# Altium footprint library IT_SENSOR_PCB.PcbLib: 1 footprints
Each footprint in its own frame and in the unit in brackets; x right, y up, seen from the top. Pads: shape width x height; smd on the part's side, far side on the other; paste and mask are expansions set on the pad; w line width, h text height; cw(c..) or ccw(c..) is an arc to the next point about the centre after c.
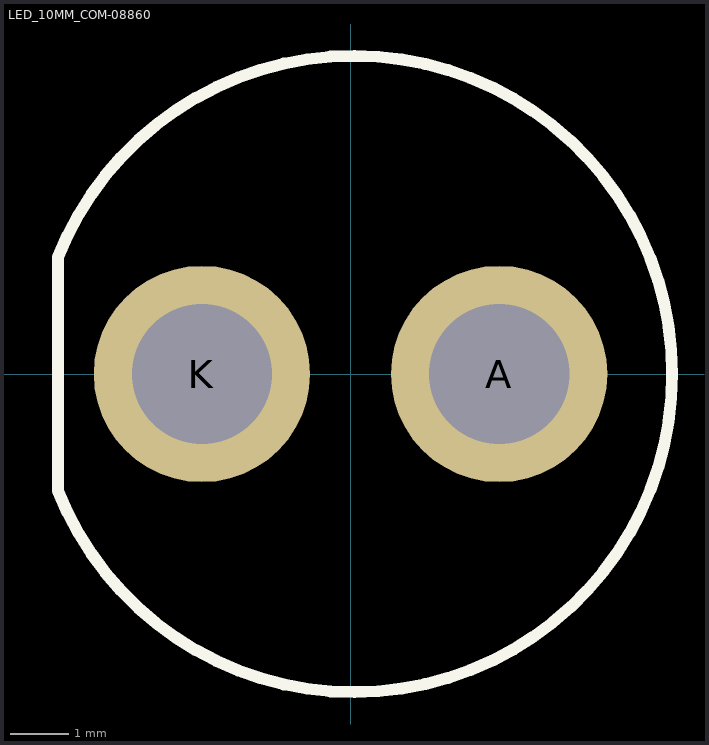
[diagram p0: the footprint, top view; thin cyan lines are the x and y axes]

## LED_10MM_COM-08860 [mm]
pads (2):
  round 3.7 hole 2.4: A(2.54,0) K(-2.54,0)
Top Overlay:
  lines w0.203: -5,-2 ccw(c0.059,0) -5,2 -5,-2